# Altium footprint library NTIR_Passives.PcbLib: 28 footprints (part 2 of 2)
Each footprint in its own frame and in the unit in brackets; x right, y up, seen from the top. Pads: shape width x height; smd on the part's side, far side on the other; paste and mask are expansions set on the pad; w line width, h text height; cw(c..) or ccw(c..) is an arc to the next point about the centre after c.
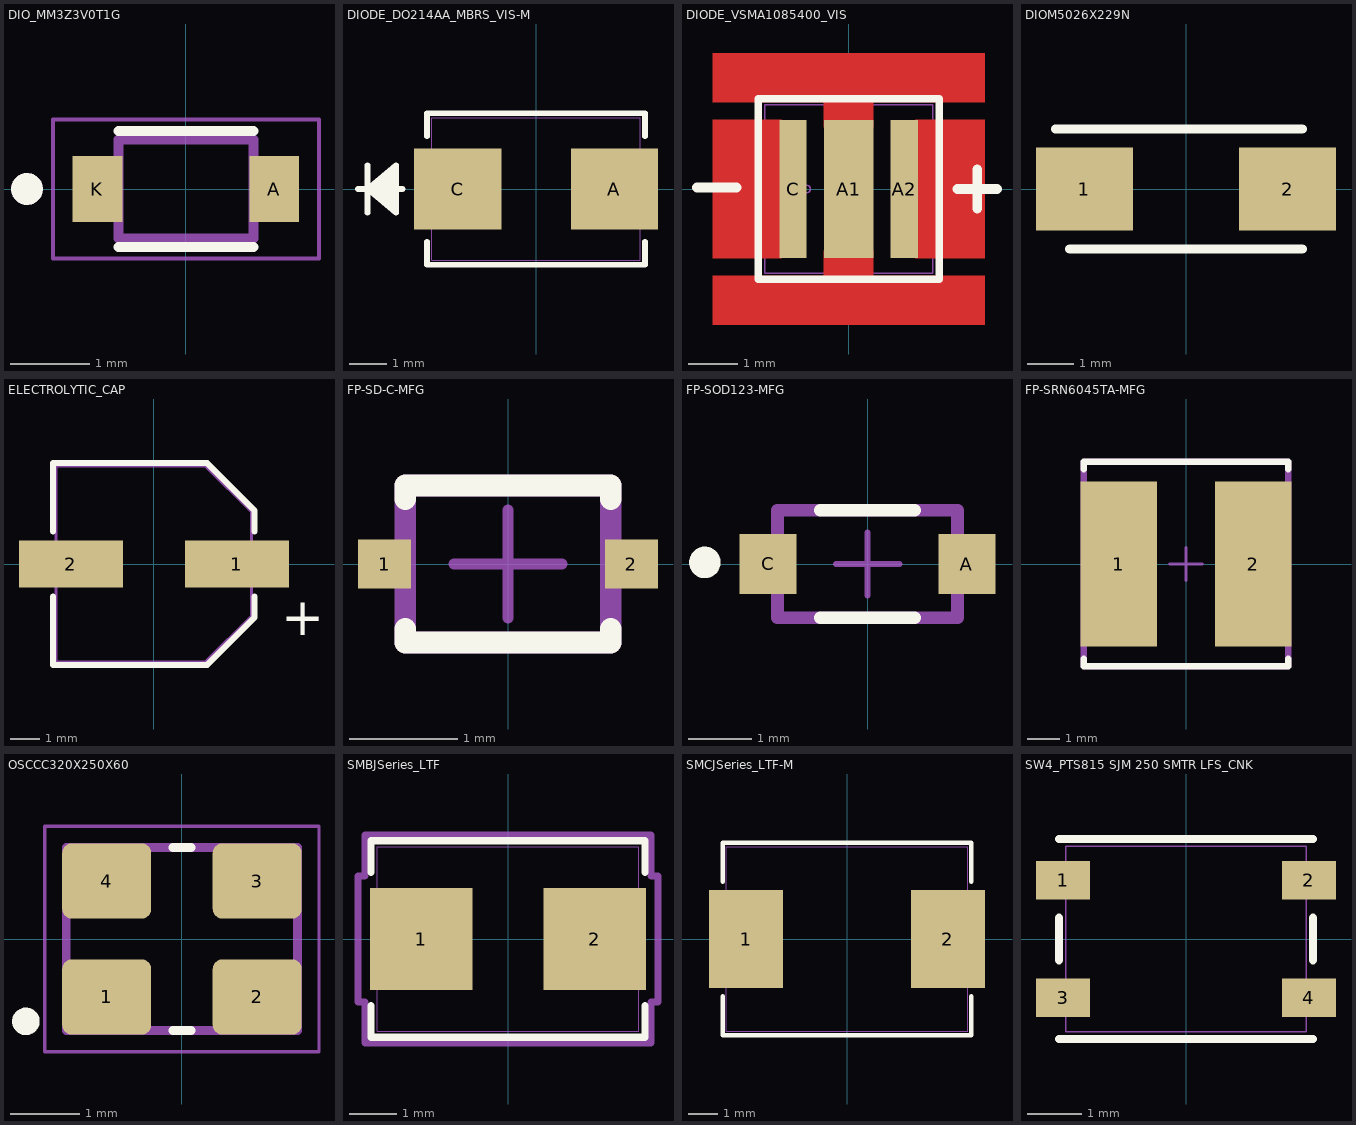
[diagram p1: the footprints below, top view; thin cyan lines are the x and y axes]

## DIO_MM3Z3V0T1G [mm]
pads (2):
  rect 0.625x0.83 smd mask+0.051: A(1.112,0) K(-1.112,0)
Top Overlay:
  circle w0.2: c-2,0 r0.1
  lines w0.127: -0.85,-0.728 0.85,-0.728 ; -0.85,0.728 0.85,0.728
Mechanical 13:
  circle w0.2: c-2,0 r0.1
  lines w0.127: -0.85,-0.625 -0.85,0.625 0.85,0.625 0.85,-0.625 -0.85,-0.625
Mechanical 15:
  lines w0.05: -1.675,-0.875 -1.675,0.875 1.675,0.875 1.675,-0.875 -1.675,-0.875
3D body "step_temp.STEP": height 1, standoff 0, extent -1.25,-0.619 1.25,0.619

## DIODE_DO214AA_MBRS_VIS-M [mil]
pads (2):
  rect 92x85 smd paste+0 mask+2: A(82.68,0) C(-82.68,0)
Top Overlay:
  lines w6: -187.87,0 -140.97,0 ; -177.87,-25 -177.87,25 ; -147.87,-20 -177.87,0 ; -147.87,-15 -177.87,0 ; -147.87,-10 -177.87,0 ; -147.87,-5 -177.87,0 ; -147.87,5 -177.87,0 ; -147.87,10 -177.87,0 ; -147.87,15 -177.87,0 ; -147.87,20 -177.87,0 ; -115,-55.6 -115,-80 115,-80 115,-55.6 ; -115,55.6 -115,80 115,80 115,55.6 ; -177.87,0 -147.87,25 -147.87,-25 -177.87,0
Mechanical 13:
  lines w1: -187.87,0 -137.87,0 ; -177.87,-25 -177.87,25 ; -147.87,-20 -177.87,0 ; -147.87,-15 -177.87,0 ; -147.87,-10 -177.87,0 ; -147.87,-5 -177.87,0 ; -147.87,5 -177.87,0 ; -147.87,10 -177.87,0 ; -147.87,15 -177.87,0 ; -147.87,20 -177.87,0 ; -177.87,0 -147.87,25 -147.87,-25 -177.87,0 ; -110,-75 110,-75 110,75 -110,75 -110,-75
3D body "DIODE_DO214AA_MBRS_VIS.step": height 95.98, standoff 0, extent -110,-75 110,75

## DIODE_VSMA1085400_VIS [mm]
pads (3):
  rect 1x2.8 smd paste-0.5 mask+0.051: A1(0,0)
  rect 0.55x2.8 smd paste-0.025 mask+0.051: A2(1.125,0) C(-1.125,0)
Top Layer:
  region: -0.5,-1.75 -0.5,-2.75 2.75,-2.75 2.75,-1.75
  region: -0.5,2.75 -0.5,1.75 2.75,1.75 2.75,2.75
  region: -0.5,-1.75 0.5,-1.75 0.5,-1.25 -0.5,-1.25
  region: -0.5,1.25 0.5,1.25 0.5,1.75 -0.5,1.75
  region: -2.75,1.4 -1.35,1.4 -1.35,-1.4 -2.75,-1.4
  region: 1.35,1.4 2.75,1.4 2.75,-1.4 1.35,-1.4
  region: 0,-1.4
  region: 0,1.4
  region: -2.75,-1.75 -2.75,-2.75 0.5,-2.75 0.5,-1.75
  region: -2.75,2.75 -2.75,1.75 0.5,1.75 0.5,2.75
Top Overlay:
  lines w0.152: -1.829,-1.829 -1.829,1.829 1.829,1.829 1.829,-1.829 -1.829,-1.829
  lines w0.2: -3.069,0.028 -2.269,0.028 ; 2.2,0 3,0 ; 2.6,-0.4 2.6,0.4
Top Paste:
  region: 0.4,-0.1 -0.4,-0.1 -0.4,-1.3 0.4,-1.3
  region: 0.4,1.3 -0.4,1.3 -0.4,0.1 0.4,0.1
Top Solder:
  region: 0,-1.4
  region: 0,1.4
Mechanical 13:
  circle w0.025: c-0.85,0 r0.076
  lines w0.025: -0.305,1.702 ccw(c0,1.702) 0.305,1.702 ; -1.702,-1.702 -1.702,1.702 1.702,1.702 1.702,-1.702 -1.702,-1.702
3D body "80324_MarCom-3D-VSMA10xx25_3D.stp": height 2.91, standoff 0.02, extent -1.701,-1.701 1.701,1.701

## DIOM5026X229N [mm]
pads (2):
  rect 2.1x1.8 smd paste+0 mask+0.102: 1(-2.2,0) 2(2.2,0)
Top Overlay:
  lines w0.2: -2.825,1.298 2.52,1.298 ; -2.52,-1.298 2.52,-1.298
3D body "step_temp.STEP": height 2.4, standoff 0, extent -2.605,-1.302 2.605,1.302

## ELECTROLYTIC_CAP [mm]
pads (2):
  rect 3.5x1.6 smd: 1(2.8,0) 2(-2.8,0)
Top Overlay:
  lines w0.2: -3.4,-1.1 -3.4,-3.4 1.8,-3.4 3.4,-1.8 3.4,-1.1 ; -3.4,1.1 -3.4,3.4 1.8,3.4 3.4,1.8 3.4,1.1
  text "+" at 4.3,-2.4 h1.27
Mechanical 13:
  lines w0.1: -3.3,-3.3 1.75,-3.3 3.3,-1.75 3.3,1.75 1.75,3.3 -3.3,3.3 -3.3,-3.3
  text "+" at 4.3,-2.4 h1.27
3D body "step_temp.STEP": height 7.55, standoff -0.15, extent -3.65,-3.3 3.65,3.3

## FP-SD-C-MFG [mm]
pads (2):
  rect 0.49x0.45 smd paste+0 mask+0.051: 1(-1.14,0) 2(1.14,0)
Top Overlay:
  lines w0.2: -0.95,-0.6 -0.95,-0.725 0.95,-0.725 0.95,-0.6 ; -0.95,0.6 -0.95,0.725 0.95,0.725 0.95,0.6
Top 3D Body:
  lines w0.2: -0.95,-0.725 -0.95,0.725 0.95,0.725 0.95,-0.725 -0.95,-0.725
Top Component Center:
  lines w0.1: -0.5,0 0.5,0 ; 0,-0.5 0,0.5
3D body "Diode_Littelfuse_SD24C-01FTG_eec.STEP": height 0.25, standoff 0, extent -1.485,-0.825 1.485,0.825

## FP-SOD123-MFG [mm]
height 7.7
pads (2):
  rect 0.9x0.95 smd paste+0 mask+0.051: A(1.575,0) C(-1.575,0)
Top Overlay:
  circle w0.25: c-2.575,0.025 r0.125
  lines w0.2: -0.75,-0.85 0.75,-0.85 ; -0.75,0.85 0.75,0.85
Top 3D Body:
  lines w0.2: -1.425,-0.85 1.425,-0.85 1.425,0.85 -1.425,0.85 -1.425,-0.85
Top Component Center:
  lines w0.1: -0.5,0 0.5,0 ; 0,-0.5 0,0.5
3D body "Diode_Diodes_Inc_MMSZ5245B-7-F_eec.STEP": height 0.25, standoff 0, extent -2.125,-0.95 2.125,0.95

## FP-SRN6045TA-MFG [mm]
height 8.54
pads (2):
  rect 2.35x5.1 smd paste+0 mask+0.051: 1(-2.075,0) 2(2.075,0)
Top Overlay:
  lines w0.2: -3.15,-2.925 -3.15,-3.15 3.15,-3.15 3.15,-2.925 ; -3.15,2.925 -3.15,3.15 3.15,3.15 3.15,2.925
Top 3D Body:
  lines w0.2: -3.15,-3.15 -3.15,3.15 3.15,3.15 3.15,-3.15 -3.15,-3.15
Top Component Center:
  lines w0.1: -0.5,0 0.5,0 ; 0,-0.5 0,0.5
3D body "Ind_Bourns_SRN6045TA-220M_eec.STEP": height 4.5, standoff 0, extent -2.939,-3.271 3.061,3.061

## OSCCC320X250X60 [mm]
pads (4):
  rrect25% 1.29x1.09 smd mask+0.051: 1(-1.09,-0.84) 2(1.09,-0.84) 3(1.09,0.84) 4(-1.09,0.84)
Top Overlay:
  circle w0.2: c-2.261,-1.194 r0.1
  lines w0.127: -0.132,-1.325 0.132,-1.325 ; -0.132,1.325 0.132,1.325
Top 3D Body:
  lines w0.127: -1.675,-1.325 -1.675,1.325 1.675,1.325 1.675,-1.325 -1.675,-1.325
Mechanical 15:
  lines w0.05: -1.985,-1.635 -1.985,1.635 1.985,1.635 1.985,-1.635 -1.985,-1.635
3D body "TSX-3225 24.0000MF15X-AC3.STEP": height 0.6, standoff 0, extent -1.6,-1.25 1.6,1.25

## SMBJSeries_LTF [mil]
pads (2):
  rect 86x86 smd paste+0 mask+2: 1(-73,0) 2(73,0)
Top Overlay:
  lines w6: -115,-56.1 -115,-82.5 115,-82.5 115,-56.1 ; -115,56.1 -115,82.5 115,82.5 115,56.1
Top 3D Body:
  lines w1: -110,-77.5 -110,77.5 110,77.5 110,-77.5 -110,-77.5
Mechanical 15:
  lines w6: -126,-53 -120,-53 -120,-87.5 120,-87.5 120,-53 126,-53 126,53 120,53 120,87.5 -120,87.5 -120,53 -126,53 -126,-53
3D body "SMBJSeries_LTF.step": height 97.99, standoff 0, extent -110,-77.48 110,77.48

## SMCJSeries_LTF-M [mm]
pads (2):
  rect 2.5x3.3 smd paste+0 mask+0.051: 1(-3.4,0) 2(3.4,0)
Top Overlay:
  lines w0.152: -4.191,-1.933 -4.191,-3.238 4.191,-3.238 4.191,-1.933 ; -4.191,1.933 -4.191,3.238 4.191,3.238 4.191,1.933
Mechanical 13:
  lines w0.025: -4.064,-3.111 4.064,-3.111 4.064,3.111 -4.064,3.111 -4.064,-3.111
3D body "SMCJSeries_LTF.step": height 2.67, standoff 0, extent -4.064,-3.112 4.064,3.112

## SW4_PTS815 SJM 250 SMTR LFS_CNK [mm]
pads (4):
  rect 0.991x0.711 smd paste+0 mask+0.051: 1(-2.25,1.075) 2(2.25,1.075) 3(-2.25,-1.075) 4(2.25,-1.075)
Top Overlay:
  lines w0.152: -2.324,-1.829 2.324,-1.829 ; -2.324,-0.387 -2.324,0.387 ; -2.324,1.829 2.324,1.829 ; 2.324,-0.387 2.324,0.387
Mechanical 13:
  lines w0.025: -2.197,-1.702 -2.197,1.702 2.197,1.702 2.197,-1.702 -2.197,-1.702
3D body "PTS810SJM250SMTR LFS.STEP": height 2.7, standoff 0, extent -2.3,-1.6 2.3,1.6